# Altium footprint library LTST-C170TBKT.PcbLib: 1 footprints
Each footprint in its own frame and in the unit in brackets; x right, y up, seen from the top. Pads: shape width x height; smd on the part's side, far side on the other; paste and mask are expansions set on the pad; w line width, h text height; cw(c..) or ccw(c..) is an arc to the next point about the centre after c.
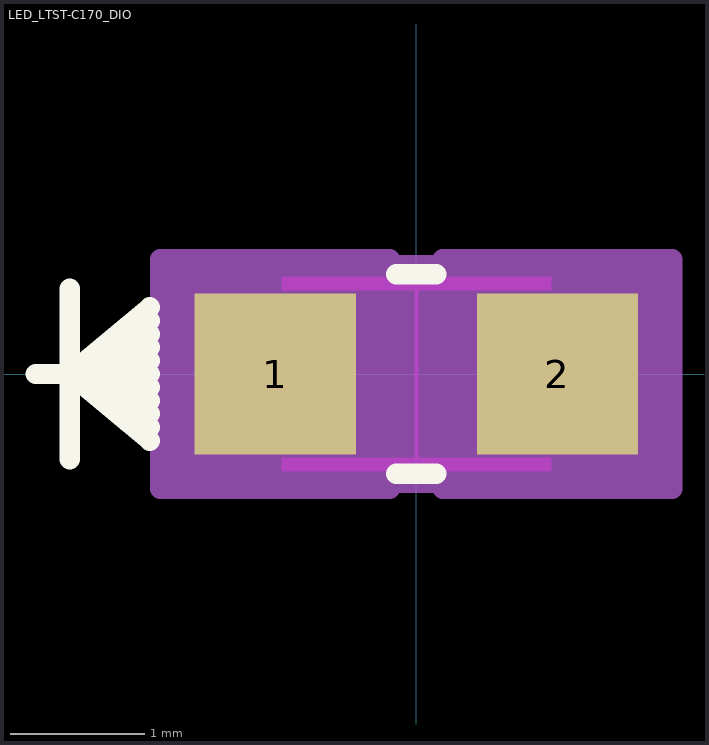
[diagram p0: the footprint, top view; thin cyan lines are the x and y axes]

## LED_LTST-C170_DIO [mm]
pads (2):
  rect 1.2x1.2 smd paste-0.6 mask+0: 1(-1.05,0) 2(1.05,0)
Top Layer keep-out:
  region: 0.013,-0.724 0.013,0.724 -0.013,0.724 -0.013,-0.724
  region: -1.003,0.724 -1.003,0.622 1.003,0.622 1.003,0.724
  region: -1.003,-0.622 -1.003,-0.724 1.003,-0.724 1.003,-0.622
Top Overlay:
  lines w0.152: -2.832,0 -1.983,0 ; -2.578,-0.635 -2.578,0.635 ; -1.983,-0.496 -2.578,0 ; -1.983,-0.397 -2.578,0 ; -1.983,-0.298 -2.578,0 ; -1.983,-0.198 -2.578,0 ; -1.983,-0.099 -2.578,0 ; -1.983,0.099 -2.578,0 ; -1.983,0.198 -2.578,0 ; -1.983,0.298 -2.578,0 ; -1.983,0.397 -2.578,0 ; -1.983,0.496 -2.578,0 ; -0.149,-0.741 0.149,-0.741 ; -0.149,0.741 0.149,0.741
  text ".Designator" at -3.492,-0.635 h1.27
Keep-Out Layer:
  region: 0.013,-0.724 0.013,0.724 -0.013,0.724 -0.013,-0.724
Mechanical 13:
  lines w0.025: -2.832,0 -1.562,0 ; -2.578,-0.635 -2.578,0.635 ; -1.816,-0.508 -2.578,0 ; -1.816,-0.381 -2.578,0 ; -1.816,-0.254 -2.578,0 ; -1.816,-0.127 -2.578,0 ; -1.816,0.127 -2.578,0 ; -1.816,0.254 -2.578,0 ; -1.816,0.381 -2.578,0 ; -1.816,0.508 -2.578,0 ; -2.578,0 -1.816,0.635 -1.816,-0.635 -2.578,0 ; -1.054,-0.673 1.054,-0.673 1.054,0.673 -1.054,0.673 -1.054,-0.673
  text ".Designator" at -3.492,-0.635 h1.27
Mechanical 15:
  region: 0.196,0.81 -0.196,0.81 -0.196,0.854 -1.904,0.854 -1.904,-0.854 -0.196,-0.854 -0.196,-0.81 0.196,-0.81 0.196,-0.854 1.904,-0.854 1.904,0.854 0.196,0.854
  lines w0.152: -1.904,-0.854 -1.904,0.854 -0.196,0.854 -0.196,0.81 0.196,0.81 0.196,0.854 1.904,0.854 1.904,-0.854 0.196,-0.854 0.196,-0.81 -0.196,-0.81 -0.196,-0.854 -1.904,-0.854